# Altium footprint library 电感.PcbLib: 46 footprints (part 1 of 3)
Each footprint in its own frame and in the unit in brackets; x right, y up, seen from the top. Pads: shape width x height; smd on the part's side, far side on the other; paste and mask are expansions set on the pad; w line width, h text height; cw(c..) or ccw(c..) is an arc to the next point about the centre after c.
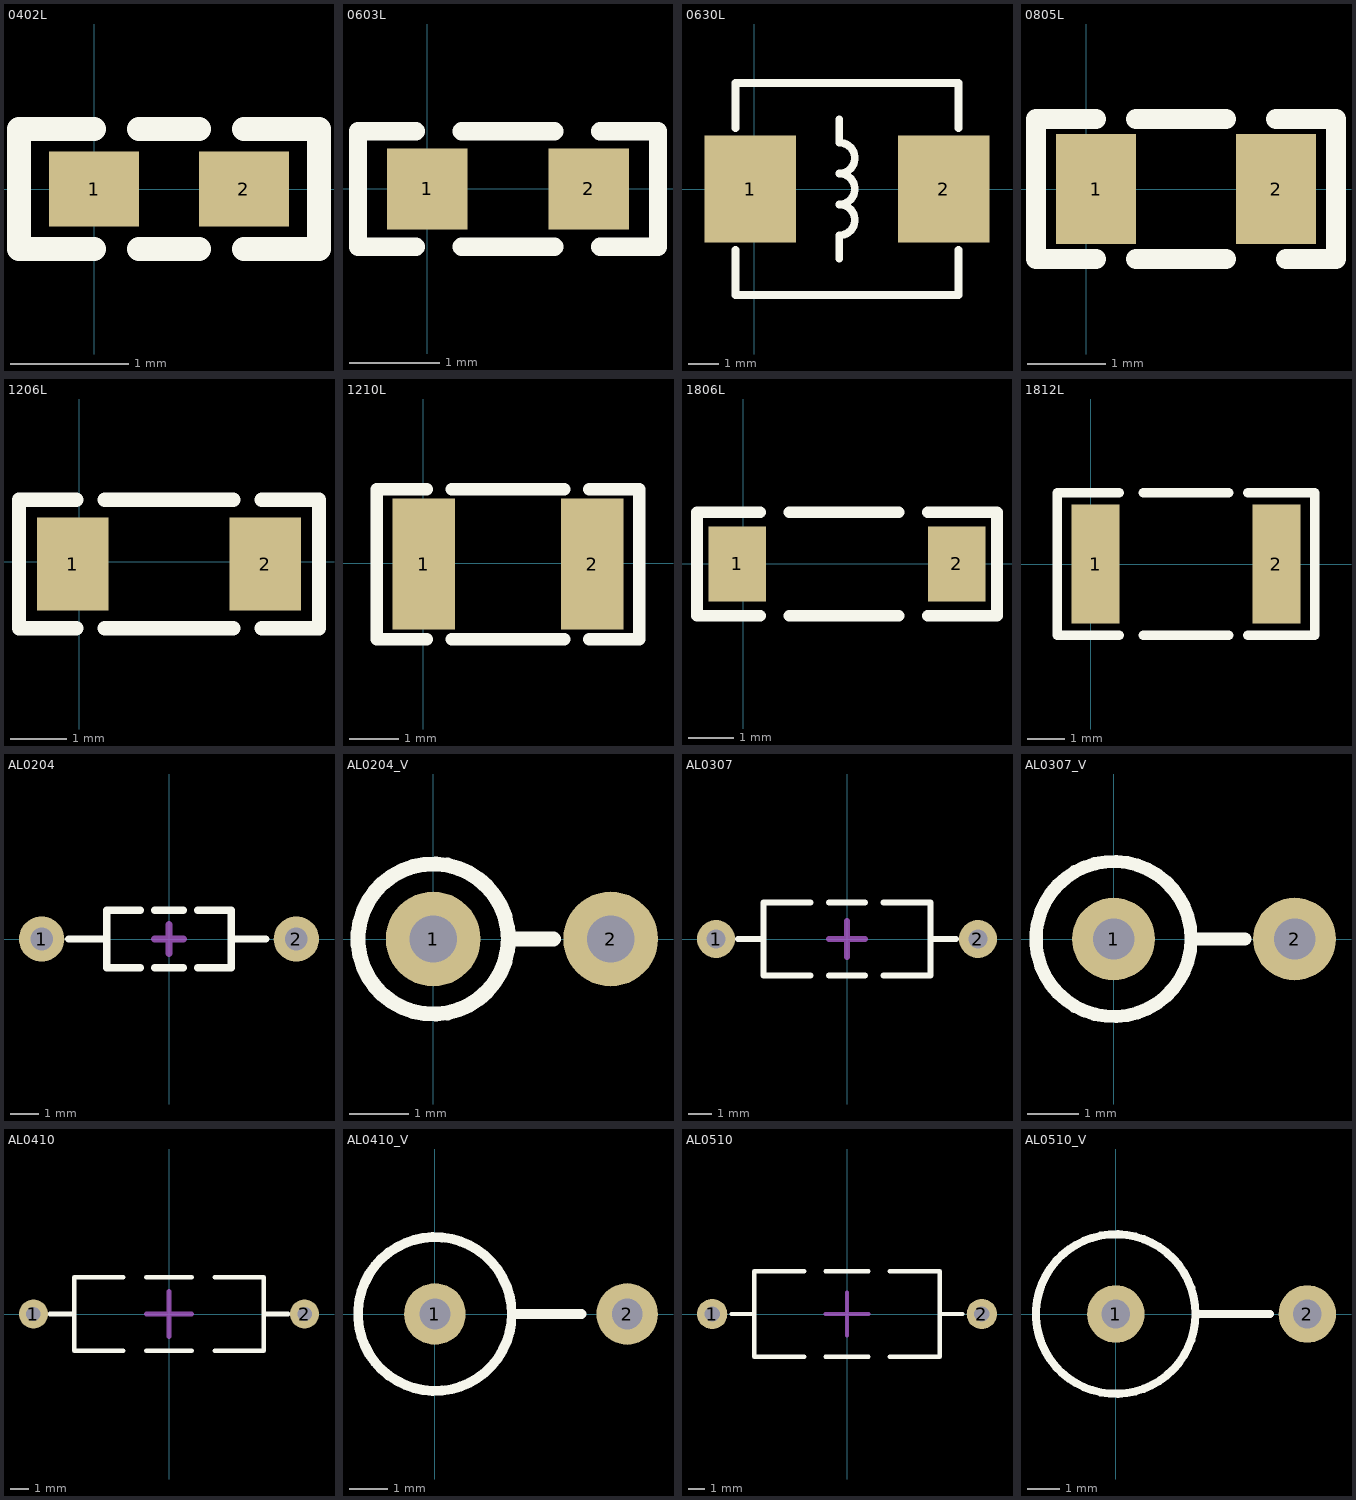
[diagram p0: the footprints below, top view; thin cyan lines are the x and y axes]

## 0402L [mil]
pads (2):
  rect 30x25 smd: 1(0,0) 2(50,0)
Top Overlay:
  lines w8: 0,-20 -25,-20 -25,20 -15,20 0,20 ; 15,-20 35,-20 ; 15,20 35,20 ; 50,-20 75,-20 75,20 50,20
3D body "0402L.STEP": height 19.68, standoff 0, extent 5.31,-9.68 44.69,10

## 0603L [mil] "小功率贴片电感"
pads (2):
  rect 35x35 smd: 1(0,0) 2(70,0)
Top Overlay:
  lines w8: -5,-25 -30,-25 -30,25 -5,25 ; 15,-25 55,-25 ; 15,25 55,25 ; 75,-25 100,-25 100,25 75,25
3D body "0603L.STEP": height 31.5, standoff 0, extent 3.5,-16.5 66.5,15

## 0630L [mm]
pads (2):
  rect 3x3.5 smd: 1(-0.127,0) 2(6.223,0)
Top Overlay:
  lines w0.254: -0.61,-2.007 -0.61,-3.48 6.706,-3.48 6.706,-2.007 ; -0.61,2.007 -0.61,3.48 6.706,3.48 6.706,2.007 ; 2.794,-2.286 2.794,-1.524 ccw(c2.794,-1.016) 2.794,-0.508 ccw(c2.794,0) 2.794,0.508 ccw(c2.794,1.016) 2.794,1.524 2.794,2.286
3D body "SMD0630L.STEP": height 3.05, standoff 0.02, extent -0.554,-3.046 6.396,3.554

## 0805L [mil] "小功率贴片电感"
pads (2):
  rect 40x55 smd: 1(5,0) 2(95,0)
Top Overlay:
  lines w10: 5,-35 -25,-35 -25,35 5,35 ; 25,-35 70,-35 ; 25,35 70,35 ; 95,35 125,35 125,-35 100,-35
3D body "0805L.STEP": height 35.43, standoff 0, extent 15,-23.62 93.74,23.62

## 1206L [mil] "小功率贴片电感"
pads (2):
  rect 50x65 smd: 1(-4.51,-1.5) 2(130.49,-1.5)
Top Overlay:
  lines w10: -2.01,-46.5 -42.01,-46.5 -42.01,43.5 -2.01,43.5 ; 17.99,-46.5 107.99,-46.5 ; 17.99,43.5 107.99,43.5 ; 127.99,-46.5 167.99,-46.5 167.99,43.5 127.99,43.5
3D body "1206L.STEP": height 35.43, standoff 0, extent 0,-31.5 125.98,31.5

## 1210L [mm] "小功率贴片电感"
pads (2):
  rect 1.27x2.667 smd: 1(0.012,-0.02) 2(3.441,-0.02)
Top Overlay:
  lines w0.254: 0.076,-1.544 -0.94,-1.544 -0.94,1.504 0.076,1.504 ; 0.584,-1.544 2.87,-1.544 ; 0.584,1.504 2.87,1.504 ; 3.378,-1.544 4.394,-1.544 4.394,1.504 3.378,1.504
3D body "1210L.STEP": height 1.3, standoff 0, extent 0,-1.25 3.2,1.25

## 1806L [mil] "小功率贴片电感"
pads (2):
  rect 50x65 smd: 1(-5,0) 2(185,0)
Top Overlay:
  lines w10: 15,-45 -40,-45 -40,45 15,45 ; 40,-45 135,-45 ; 40,45 135,45 ; 160,-45 220,-45 220,-40 220,-15 220,45 160,45
3D body "1806.STEP": height 62.99, standoff -0.19, extent 1.42,-31.5 178.58,31.5

## 1812L [mil] "小功率贴片电感"
pads (2):
  rect 50x125 smd: 1(5,0) 2(195,0)
Top Overlay:
  lines w10: 30,-75 -35,-75 -35,75 30,75 ; 55,-75 145,-75 ; 55,75 145,75 ; 165,-75 235,-75 235,75 165,75
3D body "1812L.STEP": height 59.06, standoff 0, extent 15,-62.99 192.16,62.99

## AL0204 [mm] "9*2*4mm（脚距，直径，长度）"
pads (2):
  round 1.6 hole 0.8: 1(-4.5,0) 2(4.5,0)
Top Overlay:
  lines w0.254: -3.556,0 -2.2,0 ; -1.016,-1.016 -2.2,-1.016 -2.2,1.016 -1.016,1.016 ; -0.508,-1.016 0.508,-1.016 ; -0.508,1.016 0.508,1.016 ; 1.016,-1.016 2.2,-1.016 2.2,1.016 1.016,1.016 ; 2.2,0 3.429,0
Mechanical 15:
  lines w0.254: -0.508,0 0.508,0 ; 0,-0.508 0,0.508
3D body "AL0204.STEP": height 2.07, standoff -3.5, extent -4.75,-1.016 4.75,1.017

## AL0204_V [mm] "3*2*4mm（脚距，直径，长度）"
pads (2):
  round 1.6 hole 0.8: 1(0,0) 2(3,0)
Top Overlay:
  circle w0.254: c0,0 r1.27
  lines w0.254: 1.27,0 2.032,0
3D body "AL0204_V.STEP": height 5.48, standoff -3.5, extent -1.084,-1.009 3.175,1.009

## AL0307 [mm] "11*3*7mm（脚距，直径，长度）"
pads (2):
  round 1.6 hole 0.8: 1(-5.5,0) 2(5.5,0)
Top Overlay:
  lines w0.254: -4.572,0 -3.5,0 ; -1.524,-1.524 -3.5,-1.524 -3.5,1.524 -1.524,1.524 ; -0.762,-1.524 0.762,-1.524 ; -0.762,1.524 0.762,1.524 ; 1.524,-1.524 3.5,-1.524 3.5,1.524 1.524,1.524 ; 3.5,0 4.572,0
Mechanical 15:
  lines w0.254: -0.762,0 0.762,0 ; 0,-0.762 0,0.762
3D body "AL0307.STEP": height 3.06, standoff -3.5, extent -5.715,-1.508 5.835,1.508

## AL0307_V [mm] "3.5*3*7mm（脚距，直径，长度）"
pads (2):
  round 1.6 hole 0.8: 1(0,0) 2(3.5,0)
Top Overlay:
  circle w0.254: c0,0 r1.5
  lines w0.254: 1.5,0 2.54,0
3D body "AL0307_V.STEP": height 8.81, standoff -3.5, extent -1.487,-1.524 3.81,1.514

## AL0410 [mm] "15*4*10.5mm（脚距，直径，长度）"
pads (2):
  round 1.6 hole 0.8: 1(-7.5,0) 2(7.5,0)
Top Overlay:
  lines w0.254: -6.604,0 -5.25,0 ; -2.54,-2.032 -5.25,-2.032 -5.25,2.032 -2.54,2.032 ; -1.27,-2.032 1.27,-2.032 ; -1.27,2.032 1.27,2.032 ; 2.54,-2.032 5.25,-2.032 5.25,2.032 2.54,2.032 ; 5.25,0 6.604,0
Mechanical 15:
  lines w0.254: -1.27,0 1.27,0 ; 0,-1.27 0,1.27
3D body "AL0410.STEP": height 4.06, standoff -3.5, extent -7.747,-2.005 7.803,2.005

## AL0410_V [mm] "5*4*10.5mm（脚距，直径，长度）"
pads (2):
  round 1.6 hole 0.8: 1(0,0) 2(5,0)
Top Overlay:
  circle w0.254: c0,0 r2
  lines w0.254: 2,0 3.81,0
3D body "AL0410_V.STEP": height 12.39, standoff -3.5, extent -2.001,-2.004 5.334,2.004

## AL0510 [mm] "16*5*10.5mm（脚距，直径，长度）"
pads (2):
  round 1.8 hole 0.9: 1(-8,0) 2(8,0)
Top Overlay:
  lines w0.254: -6.858,0 -5.5,0 ; -2.54,-2.54 -5.5,-2.54 -5.5,2.54 -2.54,2.54 ; -1.27,-2.54 1.27,-2.54 ; -1.27,2.54 1.27,2.54 ; 2.54,-2.54 5.5,-2.54 5.5,2.54 2.54,2.54 ; 5.5,0 6.858,0
Mechanical 15:
  lines w0.254: -1.27,0 1.27,0 ; 0,-1.27 0,1.27
3D body "AL0510.STEP": height 5.06, standoff -3.5, extent -8.318,-2.505 8.382,2.505

## AL0510_V [mm] "6*5*10.5mm（脚距，直径，长度）"
pads (2):
  round 1.8 hole 0.9: 1(0,0) 2(6,0)
Top Overlay:
  circle w0.254: c0,0 r2.5
  lines w0.254: 2.5,0 4.826,0
3D body "AL0510_V.STEP": height 13.35, standoff -3.5, extent -2.51,-2.507 6.35,2.507